# Altium footprint library Turret.PcbLib: 21 footprints (part 2 of 2)
Each footprint in its own frame and in the unit in brackets; x right, y up, seen from the top. Pads: shape width x height; smd on the part's side, far side on the other; paste and mask are expansions set on the pad; w line width, h text height; cw(c..) or ccw(c..) is an arc to the next point about the centre after c.
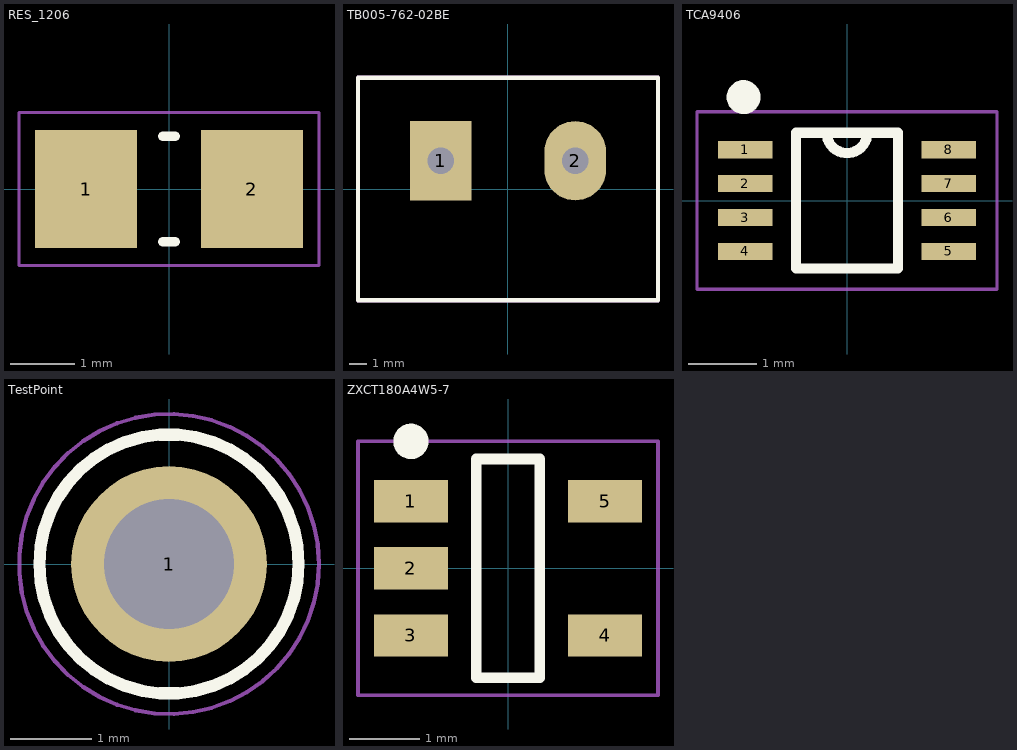
[diagram p1: the footprints below, top view; thin cyan lines are the x and y axes]

## RES_1206 [mm] "Chip Resistor, 2-Leads, Body 3,20x1,60mm, IPC Medium Density"
height 0.9
pads (2):
  rect 1.6x1.85 smd: 1(-1.3,0) 2(1.3,0)
Top Overlay:
  lines w0.15: -0.1,-0.825 0.1,-0.825 ; -0.1,0.825 0.1,0.825
Mechanical 15:
  lines w0.05: -2.35,-1.2 2.35,-1.2 2.35,1.2 -2.35,1.2 -2.35,-1.2
3D body "RESC3216X09N.step": height 0.9, standoff 0, extent -1.725,-0.925 1.725,0.925

## TB005-762-02BE [mm]
pads (2):
  rect 3.5x4.5 hole 1.5: 1(-3.81,1.6)
  oval 3.5x4.5 hole 1.5: 2(3.81,1.6)
Top Overlay:
  lines w0.254: -8.5,-6.3 -8.5,6.3 8.5,6.3 8.5,-6.3 -8.5,-6.3
Mechanical 15:
  lines w0.254: -8.5,-6.3 -8.5,6.3 8.5,6.3 8.5,-6.3 -8.5,-6.3
3D body "Same_Sky_TB005-762-02BE.step": height 21.7, standoff -4.75, extent -8.22,-6.3 7.62,6.3

## TCA9406 [mm]
pads (8):
  rect 0.8x0.254 smd: 1(-1.5,0.75) 2(-1.5,0.25) 3(-1.5,-0.25) 4(-1.5,-0.75) 5(1.5,-0.75) 6(1.5,-0.25) 7(1.5,0.25) 8(1.5,0.75)
Top Overlay:
  circle w0.25: c-1.524,1.524 r0.125
  lines w0.15: -0.3,1 ccw(c0,1) 0.3,1 ; -0.75,-1 -0.75,1 0.75,1 0.75,-1 -0.75,-1
Mechanical 15:
  lines w0.05: -2.21,-1.308 -2.21,1.308 2.21,1.308 2.21,-1.308 -2.21,-1.308
3D body "DCU8.step": height 0.89, standoff 0, extent -1.6,-1.054 1.6,1.054

## TestPoint [mm]
pads (1):
  round 2.4 hole 1.6: 1(0,0)
Top Overlay:
  circle w0.15: c0,0 r1.59
Mechanical 15:
  circle w0.05: c0,0 r1.84
3D body "step_temp.STEP": height 5.59, standoff -3.3, extent -1.587,-1.587 1.587,1.587

## ZXCT180A4W5-7 [mm] "SOT23, 5-Leads, Body 3,00x2,85mm, Pitch 0,95mm, IPC Medium Density"
height 1.3
pads (5):
  rect 1.05x0.6 smd: 1(-1.375,0.95) 2(-1.375,0) 3(-1.375,-0.95) 4(1.375,-0.95) 5(1.375,0.95)
Top Overlay:
  circle w0.25: c-1.375,1.8 r0.125
  lines w0.15: -0.45,-1.55 -0.45,1.55 0.45,1.55 0.45,-1.55 -0.45,-1.55
Mechanical 15:
  lines w0.05: -2.125,-1.8 2.125,-1.8 2.125,1.8 -2.125,1.8 -2.125,-1.8
3D body "SOT95P285X130-5N.step": height 1.3, standoff 0, extent -1.5,-1.55 1.5,1.55